# Altium footprint library IntegratedCircuit.PcbLib: 41 footprints (part 2 of 3)
Each footprint in its own frame and in the unit in brackets; x right, y up, seen from the top. Pads: shape width x height; smd on the part's side, far side on the other; paste and mask are expansions set on the pad; w line width, h text height; cw(c..) or ccw(c..) is an arc to the next point about the centre after c.
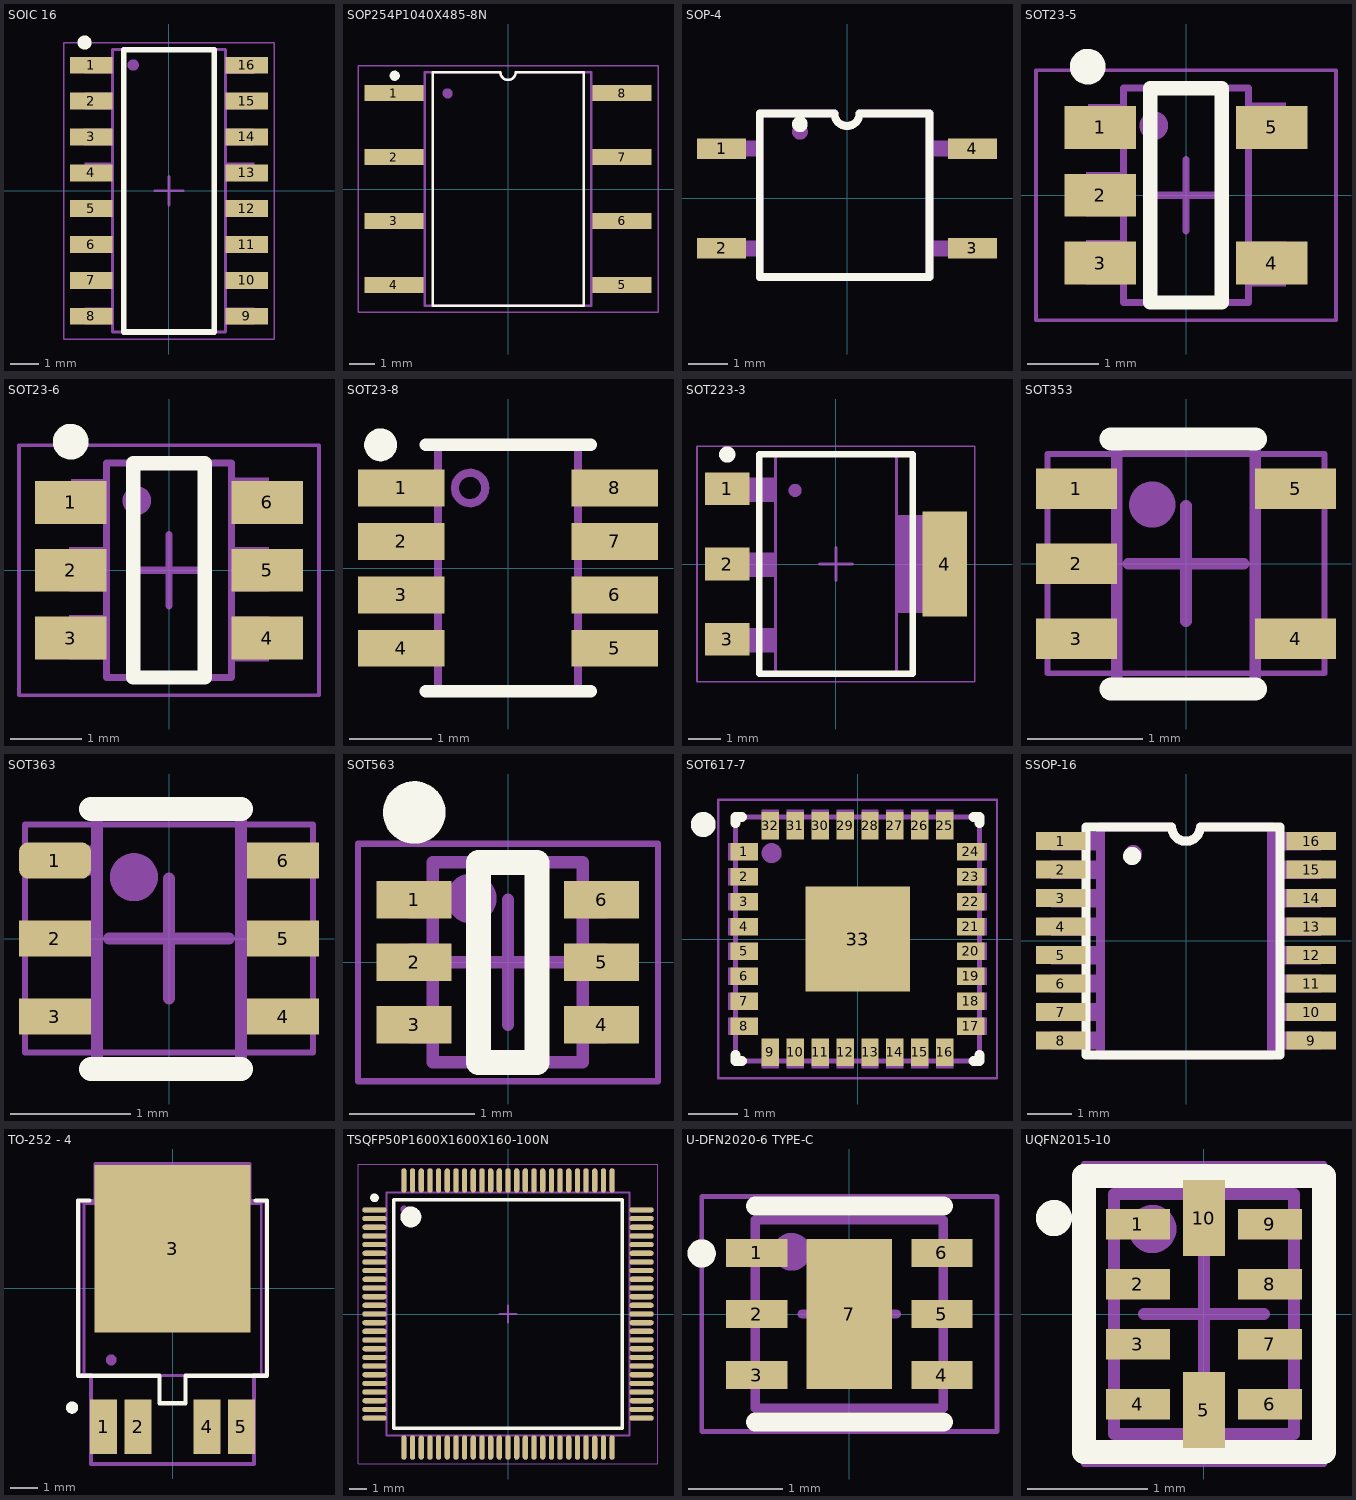
[diagram p1: the footprints below, top view; thin cyan lines are the x and y axes]

## SOIC 16 [mm] "SOIC, 16-Leads, Body 9.90x3.90mm, Pitch 1.27mm, IPC Medium Density"
height 1.75
pads (16):
  rect 1.5x0.6 smd: 1(-2.75,4.445) 2(-2.75,3.175) 3(-2.75,1.905) 4(-2.75,0.635) 5(-2.75,-0.635) 6(-2.75,-1.905) 7(-2.75,-3.175) 8(-2.75,-4.445) 9(2.75,-4.445) 10(2.75,-3.175) 11(2.75,-1.905) 12(2.75,-0.635) 13(2.75,0.635) 14(2.75,1.905) 15(2.75,3.175) 16(2.75,4.445)
Top Overlay:
  circle w0.25: c-2.99,5.25 r0.125
  lines w0.2: -1.6,-5 1.6,-5 1.6,5 -1.6,5 -1.6,-5
Top Assembly:
  circle w0.3: c-1.266,4.453 r0.05
  rectangle: 2.031,-4.738 3.027,-4.138
  rectangle: 2.031,-3.478 3.027,-2.878
  rectangle: 2.018,-2.204 3.014,-1.604
  rectangle: 2.031,0.396 3.027,0.996
  rectangle: 1.996,-0.934 2.991,-0.334
  rectangle: 2.005,1.606 3.001,2.206
  rectangle: 2.031,2.869 3.027,3.469
  rectangle: 2.031,4.142 3.027,4.742
  rectangle: -2.996,-4.735 -2,-4.135
  rectangle: -2.996,-3.475 -2,-2.875
  rectangle: -3.009,-2.201 -2.013,-1.601
  rectangle: -2.996,0.399 -2,0.999
  rectangle: -3.031,-0.931 -2.035,-0.331
  rectangle: -3.021,1.609 -2.026,2.209
  rectangle: -2.996,2.873 -2,3.473
  rectangle: -2.996,4.145 -2,4.745
  lines w0.1: -2,-5 2,-5 2,5 -2,5 -2,-5
  text ".Designator" at 0.178,-2.563 h0.5
Mechanical 15:
  lines w0.05: -3.725,-5.25 3.725,-5.25 3.725,5.25 -3.725,5.25 -3.725,-5.25
  lines w0.1: -0.5,0 0.5,0 ; 0,-0.5 0,0.5
3D body "SO16-viper26hd.step": height 1.7, standoff 0, extent -3,-5.1 3,5.1

## SOP254P1040X485-8N [mm]
height 4.85
pads (8):
  rect 2.34x0.64 smd: 1(-4.535,3.81) 2(-4.535,1.27) 3(-4.535,-1.27) 4(-4.535,-3.81) 5(4.535,-3.81) 6(4.535,-1.27) 7(4.535,1.27) 8(4.535,3.81)
Top Overlay:
  circle w0.2: c-4.5,4.5 r0.1
  lines w0.1: -2.999,-4.643 -2.999,4.643 -0.302,4.643 ccw(c0.002,4.643) 0.307,4.643 3.004,4.643 3.004,-4.643 -2.999,-4.643
Top Assembly:
  circle w0.3: c-2.4,3.8 r0.05
  rectangle: -5.225,-4.121 -3.31,-3.5
  rectangle: -5.225,-1.581 -3.31,-0.96
  rectangle: -5.225,0.959 -3.31,1.58
  rectangle: -5.225,3.499 -3.31,4.12
  region: 5.225,4.121 3.31,4.121 3.31,3.5 5.225,3.5
  region: 5.225,1.581 3.31,1.581 3.31,0.96 5.225,0.96
  region: 5.225,-0.959 3.31,-0.959 3.31,-1.58 5.225,-1.58
  region: 5.225,-3.499 3.31,-3.499 3.31,-4.12 5.225,-4.12
  lines w0.1: -3.31,-4.643 -3.31,4.643 -0.305,4.643 ccw(c0,4.643) 0.305,4.643 3.31,4.643 3.31,-4.643 -3.31,-4.643
  text ".Designator" at -2.499,-0.167 h0.5
Mechanical 15:
  lines w0.05: -5.96,-4.892 -5.96,4.892 5.96,4.892 5.96,-4.892 -5.96,-4.892
3D body "8-DUB.STEP": height 4.19, standoff -0.02, extent -5.213,-4.713 5.295,4.787

## SOP-4 [mm]
pads (4):
  rect 1.25x0.53 smd: 1(-3.2,1.27) 2(-3.2,-1.27) 3(3.2,-1.27) 4(3.2,1.27)
Top Overlay:
  circle w0.3: c-1.202,1.892 r0.05
  lines w0.2: -2.225,2.15 -2.225,-2 2.1,-2 2.1,2.15 ; -2.225,2.165 -0.318,2.165 ccw(c0,2.165) 0.318,2.165 2.1,2.165
Top Assembly:
  circle w0.3: c-1.2,1.7 r0.05
  region: 3.4,-1.069 2.1,-1.069 2.1,-1.475 3.4,-1.475
  region: 3.425,1.481 2.125,1.481 2.125,1.075 3.425,1.075
  rectangle: -3.4,-1.481 -2.225,-1.075
  rectangle: -3.4,1.069 -2.2,1.475
  lines w0.2: -2.225,2.15 -2.225,-2 2.1,-2 2.1,2.15 ; -2.225,2.165 -0.318,2.165 ccw(c0,2.165) 0.318,2.165 2.1,2.165
  text ".Designator" at -2.524,-0.167 h0.5
3D body "TLP185.step": height 2.11, standoff 0.01, extent -3.4,-2.15 3.4,2.15

## SOT23-5 [mm] "SOT23, 6-Leads, Body 2.73x2.80mm, Pitch 0.95mm, IPC Medium Density"
height 1.45
pads (5):
  rect 1x0.6 smd: 1(-1.2,0.95) 2(-1.2,0) 3(-1.2,-0.95) 4(1.2,-0.95) 5(1.2,0.95)
Top Overlay:
  circle w0.25: c-1.375,1.8 r0.125
  lines w0.2: -0.5,-1.5 0.5,-1.5 0.5,1.5 -0.5,1.5 -0.5,-1.5
Top Assembly:
  circle w0.3: c-0.45,0.975 r0.05
  rectangle: -1.375,0.65 -0.875,1.275
  rectangle: -1.4,-0.3 -0.9,0.325
  rectangle: -1.4,-1.25 -0.9,-0.625
  rectangle: 0.9,0.675 1.4,1.3
  rectangle: 0.9,-1.275 1.4,-0.65
  lines w0.1: -0.875,-1.5 -0.875,1.5 0.875,1.5 0.875,-1.5 -0.875,-1.5
  text ".Designator" at 0.217,-3.249 h0.65
Mechanical 15:
  lines w0.05: -2.1,-1.75 -2.1,1.75 2.1,1.75 2.1,-1.75 -2.1,-1.75
  lines w0.1: -0.5,0 0.5,0 ; 0,-0.5 0,0.5
3D body "ap2112k-3_3trg1.stp": height 1.11, standoff -0.04, extent -1.4,-1.5 1.4,1.5

## SOT23-6 [mm] "SOT23, 6-Leads, Body 2.73x2.80mm, Pitch 0.95mm, IPC Medium Density"
height 1.45
pads (6):
  rect 1x0.6 smd: 1(-1.375,0.95) 2(-1.375,0) 3(-1.375,-0.95) 4(1.375,-0.95) 5(1.375,0) 6(1.375,0.95)
Top Overlay:
  circle w0.25: c-1.375,1.8 r0.125
  lines w0.2: -0.5,-1.5 -0.5,1.5 0.5,1.5 0.5,-1.5 -0.5,-1.5
Top Assembly:
  circle w0.3: c-0.45,0.975 r0.05
  rectangle: 0.9,-1.275 1.4,-0.65
  rectangle: 0.9,-0.3 1.4,0.325
  rectangle: 0.9,0.675 1.4,1.3
  rectangle: -1.4,-1.25 -0.9,-0.625
  rectangle: -1.4,-0.3 -0.9,0.325
  rectangle: -1.375,0.65 -0.875,1.275
  lines w0.1: -0.875,-1.5 0.875,-1.5 0.875,1.5 -0.875,1.5 -0.875,-1.5
  text ".Designator" at 0.217,-3.249 h0.65
Mechanical 15:
  lines w0.05: -2.1,-1.75 2.1,-1.75 2.1,1.75 -2.1,1.75 -2.1,-1.75
  lines w0.1: -0.5,0 0.5,0 ; 0,-0.5 0,0.5
3D body "SOT23-6-2.step": height 1.45, standoff 0, extent -1.4,-1.45 1.4,1.45

## SOT23-8 [mm]
pads (8):
  rect 1.05x0.45 smd paste+0 mask+0: 1(-1.3,0.975) 2(-1.3,0.325) 3(-1.3,-0.325) 4(-1.3,-0.975) 5(1.3,-0.975) 6(1.3,-0.325) 7(1.3,0.325) 8(1.3,0.975)
Top Overlay:
  circle w0.2: c-1.55,1.5 r0.1
  lines w0.152: -1,-1.5 1.007,-1.5 ; -1,1.5 1.007,1.5
Top Assembly:
  circle w0.1: c-0.461,0.975 r0.185
  rectangle: -1.499,-1.165 -0.851,-0.785
  rectangle: -1.499,-0.515 -0.851,-0.135
  rectangle: -1.499,0.135 -0.851,0.515
  rectangle: -1.499,0.785 -0.851,1.165
  region: 1.499,1.165 0.851,1.165 0.851,0.785 1.499,0.785
  region: 1.499,0.515 0.851,0.515 0.851,0.135 1.499,0.135
  region: 1.499,-0.135 0.851,-0.135 0.851,-0.515 1.499,-0.515
  region: 1.499,-0.785 0.851,-0.785 0.851,-1.165 1.499,-1.165
  lines w0.1: -0.85,-1.5 0.85,-1.5 0.85,1.5 -0.85,1.5 -0.85,-1.5
  text ".Designator" at 0.217,-3.249 h0.65
3D body "RJ_8_ADI.step": height 1.45, standoff 0, extent -1.499,-1.499 1.499,1.499

## SOT223-3 [mm] "SOT223, 4-Leads, Body 6.50x7.00mm (avg), Pitch 2.30mm, IPC Medium Density"
height 1.8
pads (4):
  rect 1.35x1 smd: 1(-3.325,2.3) 2(-3.325,0) 3(-3.325,-2.3)
  rect 1.35x3.2 smd: 4(3.325,0)
Top Overlay:
  circle w0.25: c-3.325,3.35 r0.125
  lines w0.2: -2.35,-3.35 2.35,-3.35 2.35,3.35 -2.35,3.35 -2.35,-3.35
Top Assembly:
  circle w0.3: c-1.25,2.25 r0.05
  rectangle: -3.5,-2.7 -1.85,-1.95
  rectangle: -3.5,-0.4 -1.85,0.35
  rectangle: -3.5,1.9 -1.85,2.65
  region: 3.5,1.5 1.849,1.5 1.849,-1.5 3.5,-1.5
  lines w0.1: -1.85,-3.35 1.85,-3.35 1.85,3.35 -1.85,3.35 -1.85,-3.35
  text ".Designator" at 0.217,-3.279 h0.65
Mechanical 15:
  lines w0.05: -4.25,-3.6 4.25,-3.6 4.25,3.6 -4.25,3.6 -4.25,-3.6
  lines w0.1: -0.5,0 0.5,0 ; 0,-0.5 0,0.5
3D body "SOT-223.stp": height 1.61, standoff -0.04, extent -3.5,-3.25 3.5,3.25

## SOT353 [mm] "SOTFL, 6-Leads, Body 1.55x1.58mm, Pitch 0.50mm, IPC Medium Density"
height 0.6
pads (5):
  rect 0.7x0.35 smd: 1(-0.95,0.65) 2(-0.95,0) 3(-0.95,-0.65) 4(0.95,-0.65) 5(0.95,0.65)
Top Overlay:
  lines w0.2: -0.65,-1.086 0.6,-1.086 ; -0.65,1.079 0.6,1.079
Top Assembly:
  circle w0.3: c-0.292,0.511 r0.05
  region: 1.05,-0.525 0.6,-0.525 0.6,-0.775 1.05,-0.775
  region: 1.05,0.775 0.6,0.775 0.6,0.525 1.05,0.525
  rectangle: -1.05,0.525 -0.6,0.775
  rectangle: -1.05,-0.125 -0.6,0.125
  rectangle: -1.05,-0.775 -0.6,-0.525
  lines w0.1: -0.6,-1.086 -0.6,1.079 0.6,1.079 0.6,-1.086 -0.6,-1.086
  text ".Designator" at 0.333,-1.999 h0.4
Mechanical 15:
  lines w0.05: -1.2,-0.95 1.2,-0.95 1.2,0.95 -1.2,0.95 -1.2,-0.95
  lines w0.1: -0.5,0 0.5,0 ; 0,-0.5 0,0.5
3D body "SOT353.step": height 1.1, standoff 0, extent -1.2,-1.1 1.2,1.1

## SOT363 [mm] "SOTFL, 6-Leads, Body 1.55x1.58mm, Pitch 0.50mm, IPC Medium Density"
height 0.6
pads (6):
  rrect50% 0.6x0.3 smd: 1(-0.95,0.65)
  rect 0.6x0.3 smd: 2(-0.95,0) 3(-0.95,-0.65) 4(0.95,-0.65) 5(0.95,0) 6(0.95,0.65)
Top Overlay:
  lines w0.2: -0.65,-1.086 0.6,-1.086 ; -0.65,1.079 0.6,1.079
Top Assembly:
  circle w0.3: c-0.292,0.511 r0.05
  region: 1.05,-0.525 0.6,-0.525 0.6,-0.775 1.05,-0.775
  region: 1.05,0.125 0.6,0.125 0.6,-0.125 1.05,-0.125
  region: 1.05,0.775 0.6,0.775 0.6,0.525 1.05,0.525
  rectangle: -1.05,0.525 -0.6,0.775
  rectangle: -1.05,-0.125 -0.6,0.125
  rectangle: -1.05,-0.775 -0.6,-0.525
  lines w0.1: -0.6,-1.086 -0.6,1.079 0.6,1.079 0.6,-1.086 -0.6,-1.086
  text ".Designator" at 0.333,-1.999 h0.4
Mechanical 15:
  lines w0.05: -1.2,-0.95 1.2,-0.95 1.2,0.95 -1.2,0.95 -1.2,-0.95
  lines w0.1: -0.5,0 0.5,0 ; 0,-0.5 0,0.5
3D body "SOT363.stp": height 1.1, standoff 0.01, extent -1.05,-1.075 1.05,1.075

## SOT563 [mm] "SOTFL, 6-Leads, Body 1.55x1.58mm, Pitch 0.50mm, IPC Medium Density"
height 0.6
pads (6):
  rect 0.6x0.3 smd: 1(-0.75,0.5) 2(-0.75,0) 3(-0.75,-0.5) 4(0.75,-0.5) 5(0.75,0) 6(0.75,0.5)
Top Overlay:
  circle w0.25: c-0.75,1.2 r0.125
  lines w0.2: -0.235,-0.8 0.23,-0.8 0.23,0.8 -0.235,0.8 -0.235,-0.8
Top Assembly:
  circle w0.3: c-0.292,0.511 r0.05
  region: 0.796,-0.35 0.6,-0.35 0.6,-0.65 0.796,-0.65
  region: 0.796,0.15 0.6,0.15 0.6,-0.15 0.796,-0.15
  region: 0.796,0.65 0.6,0.65 0.6,0.35 0.796,0.35
  rectangle: -0.796,-0.65 -0.6,-0.35
  rectangle: -0.796,-0.15 -0.6,0.15
  rectangle: -0.796,0.35 -0.6,0.65
  lines w0.1: -0.6,-0.8 -0.6,0.8 0.6,0.8 0.6,-0.8 -0.6,-0.8
  text ".Designator" at 0.333,-1.999 h0.4
Mechanical 15:
  lines w0.05: -1.2,-0.95 -1.2,0.95 1.2,0.95 1.2,-0.95 -1.2,-0.95
  lines w0.1: -0.5,0 0.5,0 ; 0,-0.5 0,0.5
3D body "SOTFL50P158X60-6N.step": height 0.6, standoff 0, extent -0.787,-0.798 0.787,0.798

## SOT617-7 [mm] "PQFN, 32-Leads, Body 5.00x5.00mm, Pitch 0.50mm, Thermal Pad 2.10x2.10mm, IPC Medium Density"
height 1
pads (65):
  rect 0.55x0.35 smd: 1(-2.275,1.75) 2(-2.275,1.25) 3(-2.275,0.75) 4(-2.275,0.25) 5(-2.275,-0.25) 6(-2.275,-0.75) 7(-2.275,-1.25) 8(-2.275,-1.75) 17(2.275,-1.75) 18(2.275,-1.25) 19(2.275,-0.75) 20(2.275,-0.25) 21(2.275,0.25) 22(2.275,0.75) 23(2.275,1.25) 24(2.275,1.75)
  rect 0.35x0.55 smd: 9(-1.75,-2.275) 10(-1.25,-2.275) 11(-0.75,-2.275) 12(-0.25,-2.275) 13(0.25,-2.275) 14(0.75,-2.275) 15(1.25,-2.275) 16(1.75,-2.275) 25(1.75,2.275) 26(1.25,2.275) 27(0.75,2.275) 28(0.25,2.275) 29(-0.25,2.275) 30(-0.75,2.275) 31(-1.25,2.275) 32(-1.75,2.275)
  rect 2.1x2.1 smd: 33(0,0)
  rect 0.2x0.35 on Mech13: ""(-2.5,-1.75) ""(-2.5,-1.25) ""(-2.5,-0.75) ""(-2.5,-0.25) ""(-2.5,0.25) ""(-2.5,0.75) ""(-2.5,1.25) ""(-2.5,1.75) ""(2.5,-1.75) ""(2.5,-1.25) ""(2.5,-0.75) ""(2.5,-0.25) ""(2.5,0.25) ""(2.5,0.75) ""(2.5,1.25) ""(2.5,1.75)
  rect 0.35x0.2 on Mech13: ""(-1.75,-2.5) ""(-1.75,2.5) ""(-1.25,-2.5) ""(-1.25,2.5) ""(-0.75,-2.5) ""(-0.75,2.5) ""(-0.25,-2.5) ""(-0.25,2.5) ""(0.25,-2.5) ""(0.25,2.5) ""(0.75,-2.5) ""(0.75,2.5) ""(1.25,-2.5) ""(1.25,2.5) ""(1.75,-2.5) ""(1.75,2.5)
Top Overlay:
  circle w0.25: c-3.1,2.3 r0.125
  lines w0.2: -2.45,-2.325 -2.45,-2.45 -2.325,-2.45 ; -2.45,2.325 -2.45,2.45 -2.325,2.45 ; 2.325,-2.45 2.45,-2.45 2.45,-2.325 ; 2.325,2.45 2.45,2.45 2.45,2.325
Top Assembly:
  circle w0.3: c-1.725,1.725 r0.05
  lines w0.1: -2.45,-2.45 2.45,-2.45 2.45,2.45 -2.45,2.45 -2.45,-2.45
  text ".Designator" at -3.749,-0.25 h0.75
Mechanical 15:
  lines w0.05: -2.8,-2.8 2.8,-2.8 2.8,2.8 -2.8,2.8 -2.8,-2.8
  lines w0.1: -0.5,0 0.5,0 ; 0,-0.5 0,0.5
3D body "PQFN50P500X500X100_HS-33N.step": height 1, standoff 0, extent -2.45,-2.45 2.45,2.45

## SSOP-16 [mm]
pads (16):
  rect 1.1x0.4 smd: 1(-2.794,2.222) 2(-2.794,1.587) 3(-2.794,0.953) 4(-2.794,0.318) 5(-2.794,-0.318) 6(-2.794,-0.953) 7(-2.794,-1.587) 8(-2.794,-2.222) 9(2.794,-2.222) 10(2.794,-1.587) 11(2.794,-0.953) 12(2.794,-0.318) 13(2.794,0.318) 14(2.794,0.953) 15(2.794,1.587) 16(2.794,2.222)
Top Overlay:
  circle w0.3: c-1.202,1.892 r0.05
  lines w0.2: -2.225,-2.54 2.1,-2.54 2.1,2.54 0.318,2.54 cw(c0,2.54) -0.318,2.54 -2.225,2.54 -2.225,-2.54
Top Assembly:
  circle w0.3: c-1.177,1.936 r0.05
  region: 3.006,-0.114 1.905,-0.114 1.905,-0.521 3.006,-0.521
  region: 3.006,-0.749 1.905,-0.749 1.905,-1.156 3.006,-1.156
  region: 3.006,-1.384 1.905,-1.384 1.905,-1.791 3.006,-1.791
  region: 3.006,-2.019 1.905,-2.019 1.905,-2.426 3.006,-2.426
  region: 3.006,0.521 1.905,0.521 1.905,0.114 3.006,0.114
  region: 3.006,1.156 1.905,1.156 1.905,0.749 3.006,0.749
  region: 3.006,1.791 1.905,1.791 1.905,1.384 3.006,1.384
  region: 3.006,2.426 1.905,2.426 1.905,2.019 3.006,2.019
  rectangle: -3.006,0.114 -1.905,0.521
  rectangle: -3.006,0.749 -1.905,1.156
  rectangle: -3.006,1.384 -1.905,1.791
  rectangle: -3.006,2.019 -1.905,2.426
  rectangle: -3.006,-0.521 -1.905,-0.114
  rectangle: -3.006,-1.156 -1.905,-0.749
  rectangle: -3.006,-1.791 -1.905,-1.384
  rectangle: -3.006,-2.426 -1.905,-2.019
  lines w0.2: -1.905,-2.54 1.905,-2.54 1.905,2.54 0.318,2.54 cw(c0,2.54) -0.318,2.54 -1.905,2.54 -1.905,-2.54
  text ".Designator" at -2.524,-0.167 h0.5
3D body "SSOP-16_065mm.step": height 1.01, standoff -0.09, extent -2.997,-2.527 2.997,2.451

## TO-252 - 4 [mm]
pads (5):
  rect 1x2 smd paste+0 mask+0: 1(-2.54,-5.105) 2(-1.27,-5.105) 4(1.27,-5.105) 5(2.54,-5.105)
  rect 5.73x6.17 smd paste+0 mask+0: 3(0,1.445)
Top Overlay:
  circle w0.254: c-3.7,-4.4 r0.1
  lines w0.152: -3.063,3.226 -3.48,3.226 -3.48,-3.226 -0.483,-3.226 -0.483,-4.242 0.483,-4.242 0.483,-3.226 3.48,-3.226 3.48,3.226 3.063,3.226
Top Assembly:
  circle w0.3: c-2.259,-2.645 r0.05
  rectangle: 2.23,-5.95 2.855,-4.2
  rectangle: 0.96,-5.95 1.585,-4.2
  rectangle: -1.58,-5.95 -0.955,-4.2
  rectangle: -2.85,-5.95 -2.225,-4.2
  rectangle: -2.587,3.116 2.616,4.134
  lines w0.1: -3.259,3.107 -3.259,-3.218 3.266,-3.218 3.266,3.116 -3.259,3.116
  text ".Designator" at -3.749,-0.25 h0.75
Mechanical 15:
  lines w0.152: -3.454,-3.2 -2.997,-3.2 -2.997,-6.477 2.997,-6.477 2.997,-3.2 3.454,-3.2 3.454,3.2 2.832,3.2 2.832,4.572 -2.832,4.572 -2.832,3.2 -3.454,3.2 -3.454,-3.2
3D body "TO-252-4L.step": height 2.39, standoff 0, extent -3.297,-5.449 3.297,4.453

## TSQFP50P1600X1600X160-100N [mm] "TSQFP, 100-Leads, Body 14.00x14.00mm, Pitch 0.50mm, IPC Medium Density"
height 1.6
pads (200):
  oval 1.4x0.3 smd: 1(-7.7,6) 2(-7.7,5.5) 3(-7.7,5) 4(-7.7,4.5) 5(-7.7,4) 6(-7.7,3.5) 7(-7.7,3) 8(-7.7,2.5) 9(-7.7,2) 10(-7.7,1.5) 11(-7.7,1) 12(-7.7,0.5) 13(-7.7,0) 14(-7.7,-0.5) 15(-7.7,-1) 16(-7.7,-1.5) 17(-7.7,-2) 18(-7.7,-2.5) 19(-7.7,-3) 20(-7.7,-3.5) 21(-7.7,-4) 22(-7.7,-4.5) 23(-7.7,-5) 24(-7.7,-5.5) 25(-7.7,-6) 51(7.7,-6) 52(7.7,-5.5) 53(7.7,-5) 54(7.7,-4.5) 55(7.7,-4) 56(7.7,-3.5) 57(7.7,-3) 58(7.7,-2.5) 59(7.7,-2) 60(7.7,-1.5) 61(7.7,-1) 62(7.7,-0.5) 63(7.7,0) 64(7.7,0.5) 65(7.7,1) 66(7.7,1.5) 67(7.7,2) 68(7.7,2.5) 69(7.7,3) 70(7.7,3.5) 71(7.7,4) 72(7.7,4.5) 73(7.7,5) 74(7.7,5.5) 75(7.7,6)
  oval 0.3x1.4 smd: 26(-6,-7.7) 27(-5.5,-7.7) 28(-5,-7.7) 29(-4.5,-7.7) 30(-4,-7.7) 31(-3.5,-7.7) 32(-3,-7.7) 33(-2.5,-7.7) 34(-2,-7.7) 35(-1.5,-7.7) 36(-1,-7.7) 37(-0.5,-7.7) 38(0,-7.7) 39(0.5,-7.7) 40(1,-7.7) 41(1.5,-7.7) 42(2,-7.7) 43(2.5,-7.7) 44(3,-7.7) 45(3.5,-7.7) 46(4,-7.7) 47(4.5,-7.7) 48(5,-7.7) 49(5.5,-7.7) 50(6,-7.7) 76(6,7.7) 77(5.5,7.7) 78(5,7.7) 79(4.5,7.7) 80(4,7.7) 81(3.5,7.7) 82(3,7.7) 83(2.5,7.7) 84(2,7.7) 85(1.5,7.7) 86(1,7.7) 87(0.5,7.7) 88(0,7.7) 89(-0.5,7.7) 90(-1,7.7) 91(-1.5,7.7) 92(-2,7.7) 93(-2.5,7.7) 94(-3,7.7) 95(-3.5,7.7) 96(-4,7.7) 97(-4.5,7.7) 98(-5,7.7) 99(-5.5,7.7) 100(-6,7.7)
  oval 1.4x0.3 on Mech13: ""(-7.7,-6) ""(-7.7,-5.5) ""(-7.7,-5) ""(-7.7,-4.5) ""(-7.7,-4) ""(-7.7,-3.5) ""(-7.7,-3) ""(-7.7,-2.5) ""(-7.7,-2) ""(-7.7,-1.5) ""(-7.7,-1) ""(-7.7,-0.5) ""(-7.7,0) ""(-7.7,0.5) ""(-7.7,1) ""(-7.7,1.5) ""(-7.7,2) ""(-7.7,2.5) ""(-7.7,3) ""(-7.7,3.5) ""(-7.7,4) ""(-7.7,4.5) ""(-7.7,5) ""(-7.7,5.5) ""(-7.7,6) ""(7.7,-6) ""(7.7,-5.5) ""(7.7,-5) ""(7.7,-4.5) ""(7.7,-4) ""(7.7,-3.5) ""(7.7,-3) ""(7.7,-2.5) ""(7.7,-2) ""(7.7,-1.5) ""(7.7,-1) ""(7.7,-0.5) ""(7.7,0) ""(7.7,0.5) ""(7.7,1) ""(7.7,1.5) ""(7.7,2) ""(7.7,2.5) ""(7.7,3) ""(7.7,3.5) ""(7.7,4) ""(7.7,4.5) ""(7.7,5) ""(7.7,5.5) ""(7.7,6)
  oval 0.3x1.4 on Mech13: ""(-6,-7.7) ""(-6,7.7) ""(-5.5,-7.7) ""(-5.5,7.7) ""(-5,-7.7) ""(-5,7.7) ""(-4.5,-7.7) ""(-4.5,7.7) ""(-4,-7.7) ""(-4,7.7) ""(-3.5,-7.7) ""(-3.5,7.7) ""(-3,-7.7) ""(-3,7.7) ""(-2.5,-7.7) ""(-2.5,7.7) ""(-2,-7.7) ""(-2,7.7) ""(-1.5,-7.7) ""(-1.5,7.7) ""(-1,-7.7) ""(-1,7.7) ""(-0.5,-7.7) ""(-0.5,7.7) ""(0,-7.7) ""(0,7.7) ""(0.5,-7.7) ""(0.5,7.7) ""(1,-7.7) ""(1,7.7) ""(1.5,-7.7) ""(1.5,7.7) ""(2,-7.7) ""(2,7.7) ""(2.5,-7.7) ""(2.5,7.7) ""(3,-7.7) ""(3,7.7) ""(3.5,-7.7) ""(3.5,7.7) ""(4,-7.7) ""(4,7.7) ""(4.5,-7.7) ""(4.5,7.7) ""(5,-7.7) ""(5,7.7) ""(5.5,-7.7) ""(5.5,7.7) ""(6,-7.7) ""(6,7.7)
Top Overlay:
  circle w0.25: c-7.7,6.7 r0.125
  circle w0.6: c-5.6,5.6 r0.3
  lines w0.2: -6.6,-6.6 -6.6,6.6 6.6,6.6 6.6,-6.6 -6.6,-6.6
Top Assembly:
  circle w0.3: c-6,6.05 r0.05
  lines w0.1: -7,-7 -7,7 7,7 7,-7 -7,-7
  text ".Designator" at -3.749,-0.25 h0.75
Mechanical 15:
  lines w0.05: -8.65,-8.65 -8.65,8.65 8.65,8.65 8.65,-8.65 -8.65,-8.65
  lines w0.1: -0.5,0 0.5,0 ; 0,-0.5 0,0.5
3D body "TSQFP50P1600X1600X160-100N.step": height 1.6, standoff 0, extent -8,-8 8,8

## U-DFN2020-6 TYPE-C [mm] "SON, 6-Leads, Body 1.98x1.98mm, Pitch 0.65mm, Thermal Pad 1.60x0.91mm, IPC Medium Density"
height 0.6
pads (7):
  rect 0.65x0.3 smd: 1(-0.985,0.65) 2(-0.985,0) 3(-0.985,-0.65) 4(0.985,-0.65) 5(0.985,0) 6(0.985,0.65)
  rect 0.91x1.6 smd: 7(0,0)
Top Overlay:
  circle w0.2: c-1.57,0.644 r0.05
  lines w0.2: -1,1.15 1,1.15 ; -0.76,-1.15 -1,-1.15 1,-1.15
Top Assembly:
  circle w0.3: c-0.614,0.661 r0.05
  region: 1.115,0.8 1,0.8 1,0.5 1.115,0.5
  region: 1.115,0.15 1,0.15 1,-0.15 1.115,-0.15
  region: 1.115,-0.5 1,-0.5 1,-0.8 1.115,-0.8
  rectangle: -1.115,-0.8 -1,-0.5
  rectangle: -1.115,-0.15 -1,0.15
  rectangle: -1.115,0.5 -1,0.8
  lines w0.1: -1,-1 -1,1 1,1 1,-1 -1,-1
  text ".Designator" at 0.124,-1.999 h0.4
Mechanical 15:
  lines w0.05: -1.57,-1.25 -1.57,1.25 1.57,1.25 1.57,-1.25 -1.57,-1.25
  lines w0.1: -0.5,0 0.5,0 ; 0,-0.5 0,0.5
3D body "SON65P200X60_HS-7N.step": height 0.6, standoff 0, extent -1.05,-1 1.05,1

## UQFN2015-10 [mm] "SON, 6-Leads, Body 1.98x1.98mm, Pitch 0.65mm, Thermal Pad 1.60x0.91mm, IPC Medium Density"
height 0.6
pads (10):
  rect 0.53x0.254 smd: 1(-0.55,0.75) 2(-0.55,0.25) 3(-0.55,-0.25) 4(-0.55,-0.75) 6(0.55,-0.75) 7(0.55,-0.25) 8(0.55,0.25) 9(0.55,0.75)
  rect 0.35x0.63 smd: 5(0,-0.8) 10(0,0.8)
Top Overlay:
  circle w0.2: c-1.25,0.8 r0.05
  lines w0.2: -0.76,-1.15 -1,-1.15 ; -1,-1.15 -1,1.15 1,1.15 1,-1.15 -1,-1.15
Top Assembly:
  circle w0.3: c-0.429,0.708 r0.05
  rectangle: -0.814,0.672 -0.75,0.828
  rectangle: -0.814,0.172 -0.75,0.328
  rectangle: -0.814,-0.328 -0.75,-0.172
  rectangle: -0.814,-0.828 -0.75,-0.672
  region: 0.813,-0.672 0.75,-0.672 0.75,-0.828 0.813,-0.828
  region: 0.813,-0.172 0.75,-0.172 0.75,-0.328 0.813,-0.328
  region: 0.813,0.328 0.75,0.328 0.75,0.172 0.813,0.172
  region: 0.813,0.828 0.75,0.828 0.75,0.672 0.813,0.672
  lines w0.1: -0.75,-1 -0.75,1 0.75,1 0.75,-1 -0.75,-1
  text ".Designator" at 0.124,-1.999 h0.4
Mechanical 15:
  lines w0.05: -1,-1.25 -1,1.25 1,1.25 1,-1.25 -1,-1.25
  lines w0.1: -0.5,0 0.5,0 ; 0,-0.5 0,0.5
3D body "10-UQFN v1.step": height 0.64, standoff 0.01, extent -0.75,-1 0.75,1